# Altium schematic symbol library MPPT_Power_board_elements.SchLib: 38 symbols
Pins are listed as number, name and electrical type; pins without a type are passive.

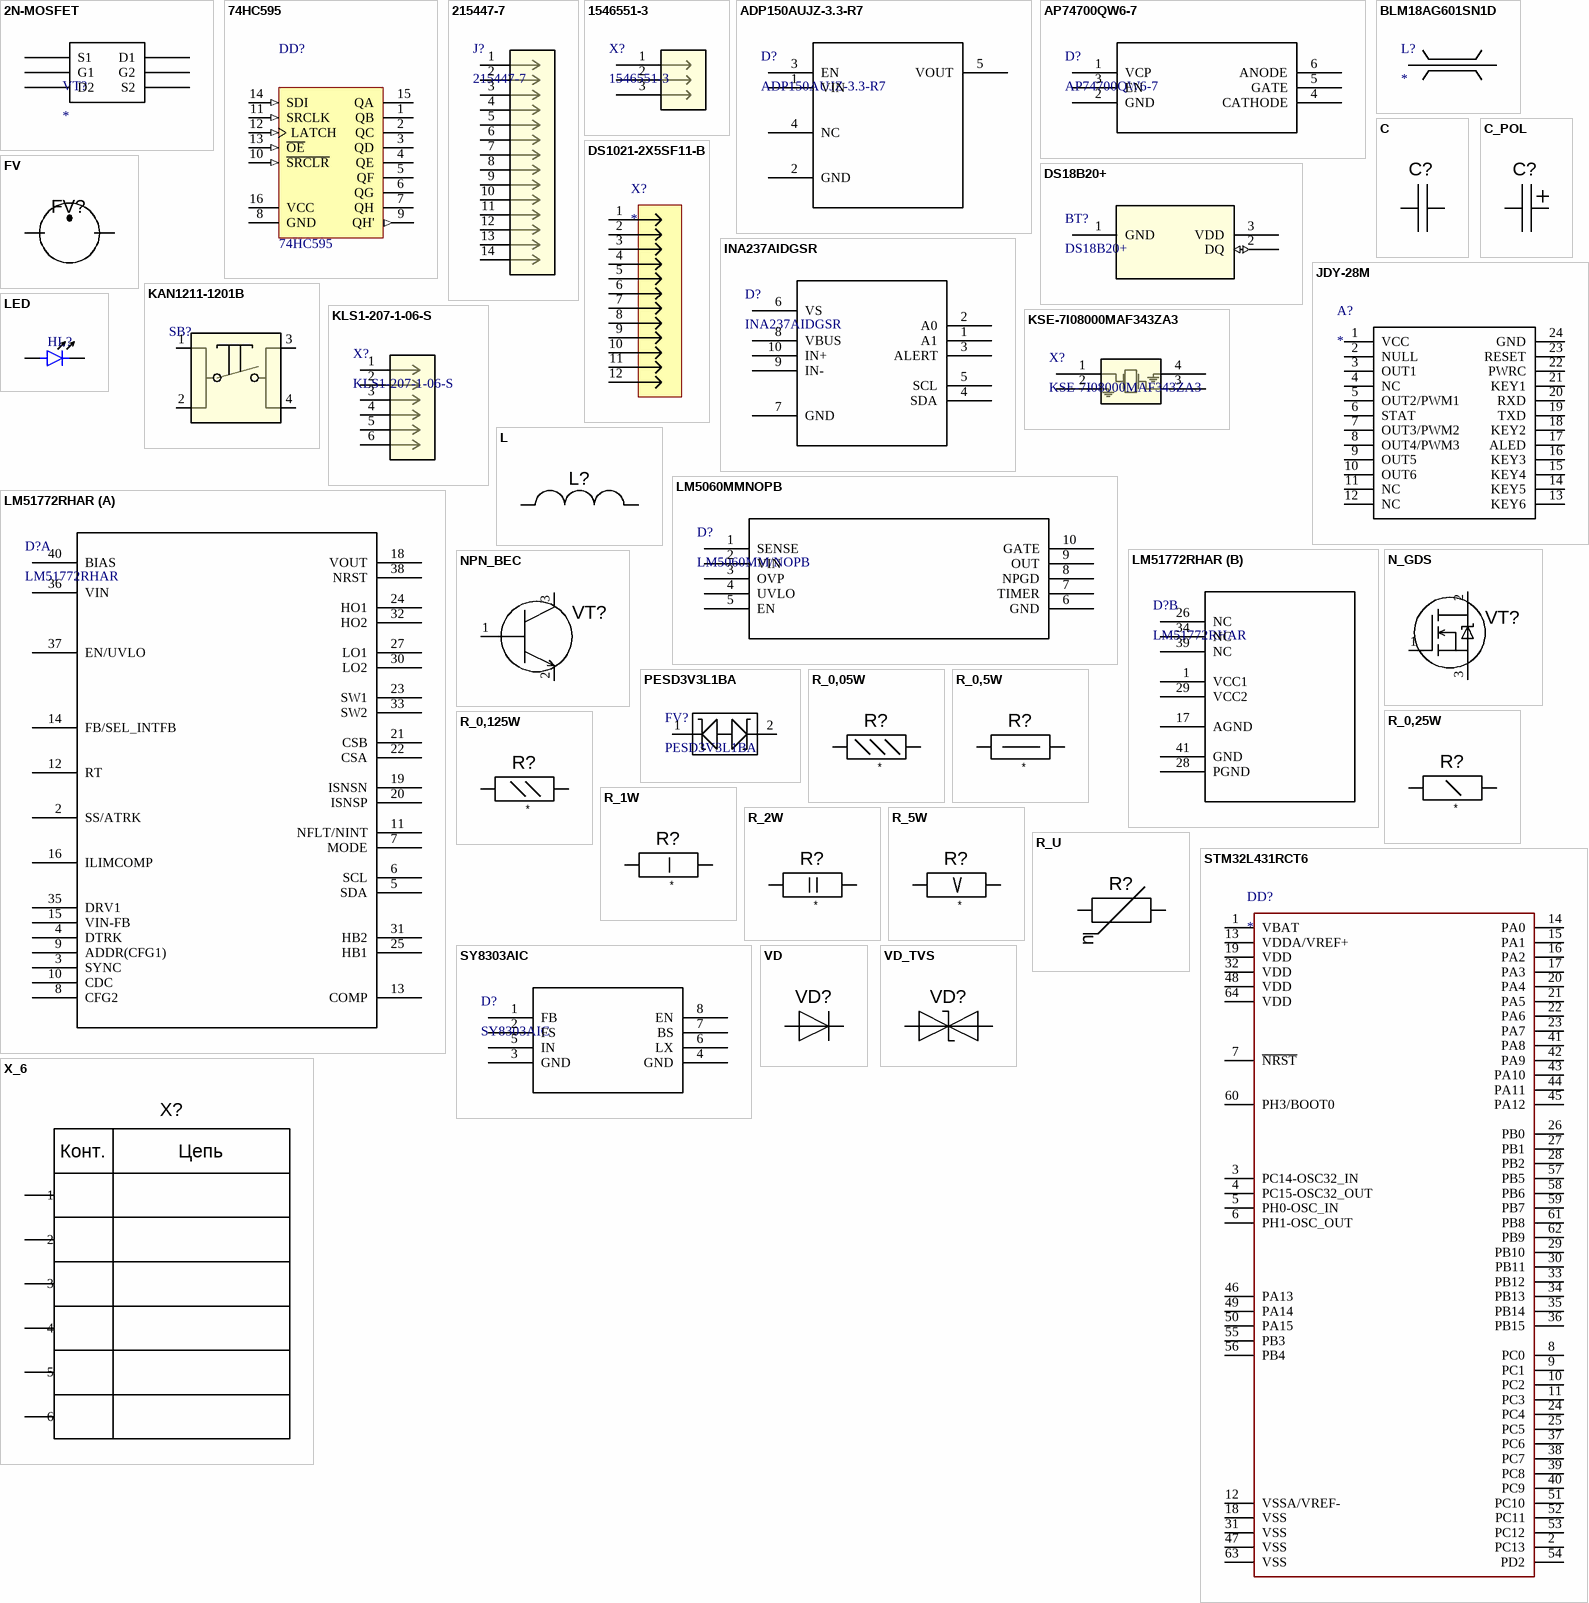
[diagram p0: symbols 2N-MOSFET to X_6]

## 2N-MOSFET
designator VT?
pins: 1 S2, 2 G2, 3 D1, 4 S1, 5 G1, 6 D2

## 74HC595
designator DD?
8-Bit Shift Register with 3-State Output Registers; OriginalSource: AltTab; Order: *
footprint SO-16
pins: 1 QB (hiz), 2 QC (hiz), 3 QD (hiz), 4 QE (hiz), 5 QF (hiz), 6 QG (hiz), 7 QH (hiz), 8 GND (power), 9 QH' (out), 10 ~{SRCLR} (in), 11 SRCLK (in), 12 LATCH (in), 13 ~{OE} (in), 14 SDI (in), 15 QA (hiz), 16 VCC (power)

## 215447-7
designator J?
2x7 POS AMPMODU MOD II HDR ACTION PIN; Manufacturer_Name: TE Connectivity; Copyright: Copyright (C) 2025 Ultra Librarian. All rights reserved.; Manufacturer_Part_Number: 215447-7; RefDes: RefDes; Type: Type
footprint CONN_215447-7_TEC
pins: 1, 2, 3, 4, 5, 6, 7, 8, 9, 10, 11, 12, 13, 14

## 1546551-3
designator X?
3P,STRAIGHT,SIDE ENTRY,3.5MM; Manufacturer_Name: TE Connectivity; Copyright: Copyright (C) 2026 Ultra Librarian. All rights reserved.; Manufacturer_Part_Number: 1546551-3; RefDes: RefDes; Type: Type
footprint CONN3_1546551-3_TEC
footprint CONN3_1546551-3_TEC
pins: 1, 2, 3

## ADP150AUJZ-3.3-R7
designator D?
Ultralow Noise, 150 mA CMOS Linear Regulator; Manufacturer_Name: Analog Devices Inc; Copyright: Copyright (C) 2025 Ultra Librarian. All rights reserved.; Manufacturer_Part_Number: ADP150AUJZ-3.3-R7; RefDes: RefDes; Type: Type
footprint SOT95P280X100-5N (SOT23, 5-Leads, Body 2,90x2,80mm, Pitch 0,95mm, IPC Medium Density)
pins: 1 VIN, 2 GND (power), 3 EN, 4 NC, 5 VOUT

## AP74700QW6-7
designator D?
Description; Manufacturer_Name: Diodes Inc; Copyright: Copyright (C) 2025 Ultra Librarian. All rights reserved.; Manufacturer_Part_Number: AP74700QW6-7; RefDes: RefDes; Type: Type
footprint SOT26_DIO
pins: 1 VCP (power), 2 GND (power), 3 EN, 4 CATHODE, 5 GATE, 6 ANODE

## BLM18AG601SN1D
designator L?
footprint FILTER_BLM18AG_MUR
pins: 1, 2

## C
designator C?
pins: 1, 2

## C_POL
designator C?
pins: 1, 2

## DS18B20+
designator BT?
Programmable Resolution 1-Wire Digital Thermometer; Manufacturer_Name: Analog Devices Inc; Copyright: Copyright (C) 2025 Ultra Librarian. All rights reserved.; Manufacturer_Part_Number: DS18B20+; RefDes: RefDes; Type: Type
footprint 21-0248A_Q3-1_MXM
pins: 1 GND (power), 2 DQ (io), 3 VDD (power)

## DS1021-2X5SF11-B
designator X?
10 positions 2.54mm dual row vertical pin header through hole; MF: Connfly; MP: DS1021-2X5SF11-B; SnapEDA_Link: https://www.snapeda.com/parts/DS1021-2X5SF11-B/Connfly/view-part/?ref=snap; Package: None; Value: *; Check_prices: https://www.snapeda.com/parts/DS1021-2X5SF11-B/Connfly/view-part/?ref=eda
footprint CONNFLY_DS1021-2X5SF11-B
footprint CONNFLY_DS1021-2X5SF11-B
pins: 1, 2, 3, 4, 5, 6, 7, 8, 9, 10, 11, 12

## FV
designator FV?
pins: 1, 2

## INA237AIDGSR
designator D?
85-V, 16-bit, I2C output current/voltage/power monitor with alert 10-VSSOP -40 to 125; Manufacturer_Name: Texas Instruments; Copyright: Copyright (C) 2026 Ultra Librarian. All rights reserved.; Manufacturer_Part_Number: INA237AIDGSR; RefDes: RefDes; Type: Type
footprint VSSOP_IDGSR_TEX
pins: 1 A1, 2 A0, 3 ALERT, 4 SDA, 5 SCL, 6 VS, 7 GND (power), 8 VBUS, 9 IN-, 10 IN+

## JDY-28M
designator A?
footprint QFN150P1495X1599X200_HS-33N (QFN, 32-Leads, Body 14,95x15,99mm, Pitch 1,50mm, Thermal Pad 11,30x11,30mm, IPC Medium Density)
pins: 1 VCC, 2 NULL, 3 OUT1, 4 NC, 5 OUT2/PWM1, 6 STAT, 7 OUT3/PWM2, 8 OUT4/PWM3, 9 OUT5, 10 OUT6, 11 NC, 12 NC, 13 KEY6, 14 KEY5, 15 KEY4, 16 KEY3, 17 ALED, 18 KEY2, 19 TXD, 20 RXD, 21 KEY1, 22 PWRC, 23 RESET, 24 GND

## KAN1211-1201B
designator SB?
KAN1211-1201B; Manufacturer_Name: C&K Components; Manufacturer_Part_Number: PTS125SM432LFS; Copyright: Copyright (C) 2025 Ultra Librarian. All rights reserved.
footprint SW4_PTS125SM432LFS_CNK
pins: 1, 2, 3, 4

## KLS1-207-1-06-S
designator X?
KLS1-207-1-06-S, Вилка штыревая 2.54мм 1x6 угловая; Manufacturer_Name: Oupiin; Manufacturer_Part_Number: 2011-1X06G00SB; Copyright: Copyright (C) 2025 Ultra Librarian. All rights reserved.; RefDes: RefDes; Type: Type
footprint CONN_2011-1X06G00SB_06P_OUP
footprint CONN_2011-1X06G00SB_06P_OUP
pins: 1, 2, 3, 4, 5, 6

## KSE-7I08000MAF343ZA3
designator X?
Description; Manufacturer_Name: Aker; Manufacturer_Part_Number: C5S-8.000-18-3030-X-R; Copyright: Copyright (C) 2025 Ultra Librarian. All rights reserved.; RefDes: RefDes; Type: Type
footprint C5S_5x3p2_SMD_AKR
footprint C5S_5x3p2_SMD_AKR
pins: 1 XTAL, 2 GND (power), 3 XTAL, 4 GND (power)

## L
designator L?
pins: 1, 2

## LED
designator HL?  (value not drawn)
Light Emittering Diode; PartValue: LED*0603 *; OriginalSource: AltTab; Order: *; Package: *0603; Wavelength: *; LCSC Part #: *
footprint LED-0805N (Chip Resistor, 2-Leads, Body 2,10x1,30mm, IPC Medium Density)
footprint LED-1206N
pins: 1 Anode, 2 Cathode

## LM5060MMNOPB
designator D?, comment LM5060MM/NOPB
5.5-V to 65-V high side protection controller 10-VSSOP -40 to 125; Manufacturer_Name: Texas Instruments; Copyright: Copyright (C) 2025 Ultra Librarian. All rights reserved.; Manufacturer_Part_Number: LM5060MM/NOPB; RefDes: RefDes; Type: Type
footprint MUB10A
pins: 1 SENSE, 2 VIN, 3 OVP, 4 UVLO, 5 EN, 6 GND (power), 7 TIMER, 8 NPGD, 9 OUT, 10 GATE

## LM51772RHAR
designator D?
55V wide VIN four-switch buck-boost controller with I2C interface 40-VQFN -40 to 125; Manufacturer_Name: Texas Instruments; Copyright: Copyright (C) 2025 Ultra Librarian. All rights reserved.; Manufacturer_Part_Number: LM51772RHAR; RefDes: RefDes; Type: Type
footprint VQFN40_6X6_3P3X3P3_TEX
part A pins: 2 SS/ATRK, 3 SYNC, 4 DTRK, 5 SDA, 6 SCL, 7 MODE, 8 CFG2, 9 ADDR(CFG1), 10 CDC, 11 NFLT/NINT, 12 RT, 13 COMP, 14 FB/SEL_INTFB, 15 VIN-FB, 16 ILIMCOMP, 18 VOUT, 19 ISNSN, 20 ISNSP, 21 CSB, 22 CSA, 23 SW1, 24 HO1, 25 HB1, 27 LO1, 30 LO2, 31 HB2, 32 HO2, 33 SW2, 35 DRV1, 36 VIN, 37 EN/UVLO, 38 NRST, 40 BIAS
part B pins: 1 VCC1 (power), 17 AGND (power), 26 NC, 28 PGND (power), 29 VCC2 (power), 34 NC, 39 NC, 41 GND (power)

## N_GDS
designator VT?
pins: 1 g, 2 d, 3 s

## NPN_BEC
designator VT?
pins: 1 b, 2 e, 3 c

## PESD3V3L1BA
designator FV?
Description; Manufacturer_Name: Nexperia; Copyright: Copyright (C) 2025 Ultra Librarian. All rights reserved.; Manufacturer_Part_Number: PESD3V3L1BA
footprint SOD323_NEX
pins: 1, 2

## R_0,05W
designator R?
Resistance: *
pins: 1, 2

## R_0,5W
designator R?
Resistance: *
pins: 1, 2

## R_0,25W
designator R?
Resistance: *
pins: 1, 2

## R_0,125W
designator R?
Resistance: *
pins: 1, 2

## R_1W
designator R?
Resistance: *
pins: 1, 2

## R_2W
designator R?
Resistance: *
pins: 1, 2

## R_5W
designator R?
Resistance: *
pins: 1, 2

## R_U
designator R?
pins: 1, 2
text: u

## STM32L431RCT6
designator DD?
footprint LQFP-64
pins: 1 VBAT, 2 PC13, 3 PC14-OSC32_IN, 4 PC15-OSC32_OUT, 5 PH0-OSC_IN, 6 PH1-OSC_OUT, 7 ~{NRST}, 8 PC0, 9 PC1, 10 PC2, 11 PC3, 12 VSSA/VREF-, 13 VDDA/VREF+, 14 PA0, 15 PA1, 16 PA2, 17 PA3, 18 VSS, 19 VDD, 20 PA4, 21 PA5, 22 PA6, 23 PA7, 24 PC4, 25 PC5, 26 PB0, 27 PB1, 28 PB2, 29 PB10, 30 PB11, 31 VSS, 32 VDD, 33 PB12, 34 PB13, 35 PB14, 36 PB15, 37 PC6, 38 PC7, 39 PC8, 40 PC9, 41 PA8, 42 PA9, 43 PA10, 44 PA11, 45 PA12, 46 PA13, 47 VSS, 48 VDD, 49 PA14, 50 PA15, 51 PC10, 52 PC11, 53 PC12, 54 PD2, 55 PB3, 56 PB4, 57 PB5, 58 PB6, 59 PB7, 60 PH3/BOOT0, 61 PB8, 62 PB9, 63 VSS, 64 VDD

## SY8303AIC
designator D?
DC/DC; Manufacturer_Name: Silergy; Copyright: Copyright (C) 2025 Ultra Librarian. All rights reserved.; Manufacturer_Part_Number: SY8303AIC; RefDes: RefDes; Type: Type
footprint TSOT_303AIC_SGY
pins: 1 FB, 2 FS, 3 GND (power), 4 GND (power), 5 IN, 6 LX, 7 BS, 8 EN

## VD
designator VD?
pins: 1 A, 2 C

## VD_TVS
designator VD?
pins: 1, 2

## X_6
designator X?
pins: 1, 2, 3, 4, 5, 6
text: Конт.; Цепь

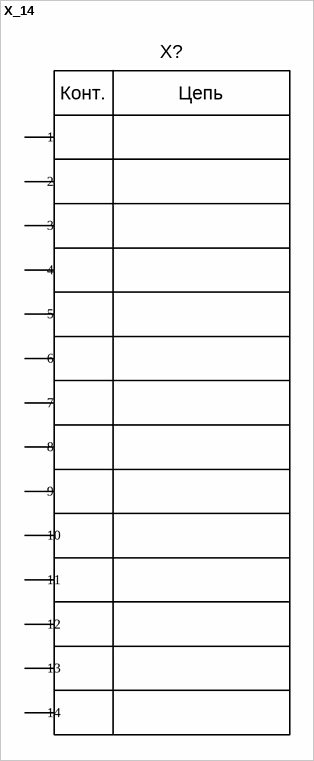
[diagram p1: symbol X_14]

## X_14
designator X?
pins: 1, 2, 3, 4, 5, 6, 7, 8, 9, 10, 11, 12, 13, 14
text: Конт.; Цепь